# Altium footprint library TVS（无极性）.PcbLib: 1 footprints
Each footprint in its own frame and in the unit in brackets; x right, y up, seen from the top. Pads: shape width x height; smd on the part's side, far side on the other; paste and mask are expansions set on the pad; w line width, h text height; cw(c..) or ccw(c..) is an arc to the next point about the centre after c.
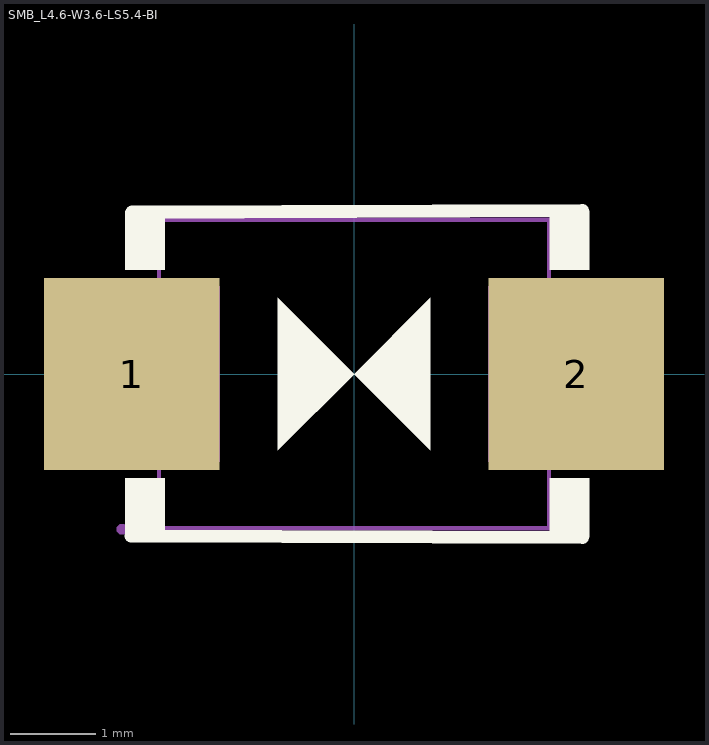
[diagram p0: the footprint, top view; thin cyan lines are the x and y axes]

## SMB_L4.6-W3.6-LS5.4-BI [mm]
pads (2):
  rect 2.047x2.241 smd: 1(-2.591,0) 2(2.591,0)
Top Overlay:
  region: 0.889,-0.762 0.889,-0.889 0.254,-0.254 0,0 0.889,0.889
  region: 0,0 -0.889,-0.889 -0.889,-0.762 -0.889,0.889
  region: 2.286,-1.905 2.286,-1.215 2.743,-1.215 2.743,-1.905
  region: 2.286,1.905 2.286,1.215 2.743,1.215 2.743,1.905
  region: -2.667,1.905 -2.667,1.215 -2.21,1.215 -2.21,1.905
  region: -2.667,-1.905 -2.667,-1.215 -2.21,-1.215 -2.21,-1.905
  lines w0.152: -2.599,-1.89 2.667,-1.905 ; -2.591,1.887 2.663,1.905
Mechanical 6:
  lines w0.051: -2.275,-1.8 -2.275,1.8 2.275,1.8 2.275,-1.8 -2.275,-1.8
Mechanical 8:
  region: -2.648,-1.81 -2.648,-1.835 -2.683,-1.87 -2.732,-1.87 -2.768,-1.835 -2.768,-1.81 -2.768,-1.785 -2.732,-1.75 -2.683,-1.75 -2.648,-1.785 -2.648,-1.81
Mechanical 9:
  region: 2.7,1.025 2.7,-1.025 1.568,-1.025 1.568,1.025
  region: -2.7,1.025 -2.7,-1.025 -1.568,-1.025 -1.568,1.025